# Altium footprint library MY_LIB_Modules.PcbLib: 1 footprints
Each footprint in its own frame and in the unit in brackets; x right, y up, seen from the top. Pads: shape width x height; smd on the part's side, far side on the other; paste and mask are expansions set on the pad; w line width, h text height; cw(c..) or ccw(c..) is an arc to the next point about the centre after c.
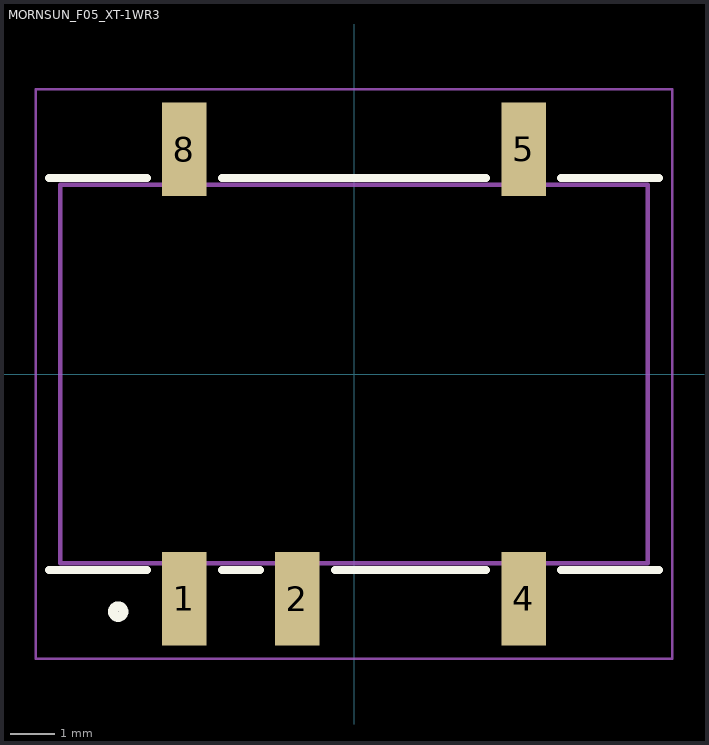
[diagram p0: the footprint, top view; thin cyan lines are the x and y axes]

## MORNSUN_F05_XT-1WR3 [mm] "MORNSUN F05_XT-1WR3 module, A/9 p6; pads 1.00x2.10, copper span 12.20 mm, official STEP"
height 7.25
pads (5):
  rect 1x2.1 smd paste+0 mask+0.05: 1(-3.81,-5.05) 2(-1.27,-5.05) 4(3.81,-5.05) 5(3.81,5.05) 8(-3.81,5.05)
Top Overlay:
  circle w0.22: c-5.3,-5.34 r0.12
  lines w0.18: -6.85,-4.4 -4.65,-4.4 ; -6.85,4.4 -4.65,4.4 ; -2.97,-4.4 -2.11,-4.4 ; -2.97,4.4 2.97,4.4 ; -0.43,-4.4 2.97,-4.4 ; 4.65,-4.4 6.85,-4.4 ; 4.65,4.4 6.85,4.4
Mechanical 13:
  lines w0.1: -6.6,-4.25 6.6,-4.25 6.6,4.25 -6.6,4.25 -6.6,-4.25
Mechanical 15:
  lines w0.05: -7.15,-6.4 7.15,-6.4 7.15,6.4 -7.15,6.4 -7.15,-6.4
3D body "F05_XT-1WR3.stp": height 7.25, standoff 0, extent -6.6,-4.25 6.6,4.25